# Altium footprint library MyPCBLib.PcbLib: 103 footprints (part 1 of 7)
Each footprint in its own frame and in the unit in brackets; x right, y up, seen from the top. Pads: shape width x height; smd on the part's side, far side on the other; paste and mask are expansions set on the pad; w line width, h text height; cw(c..) or ccw(c..) is an arc to the next point about the centre after c.
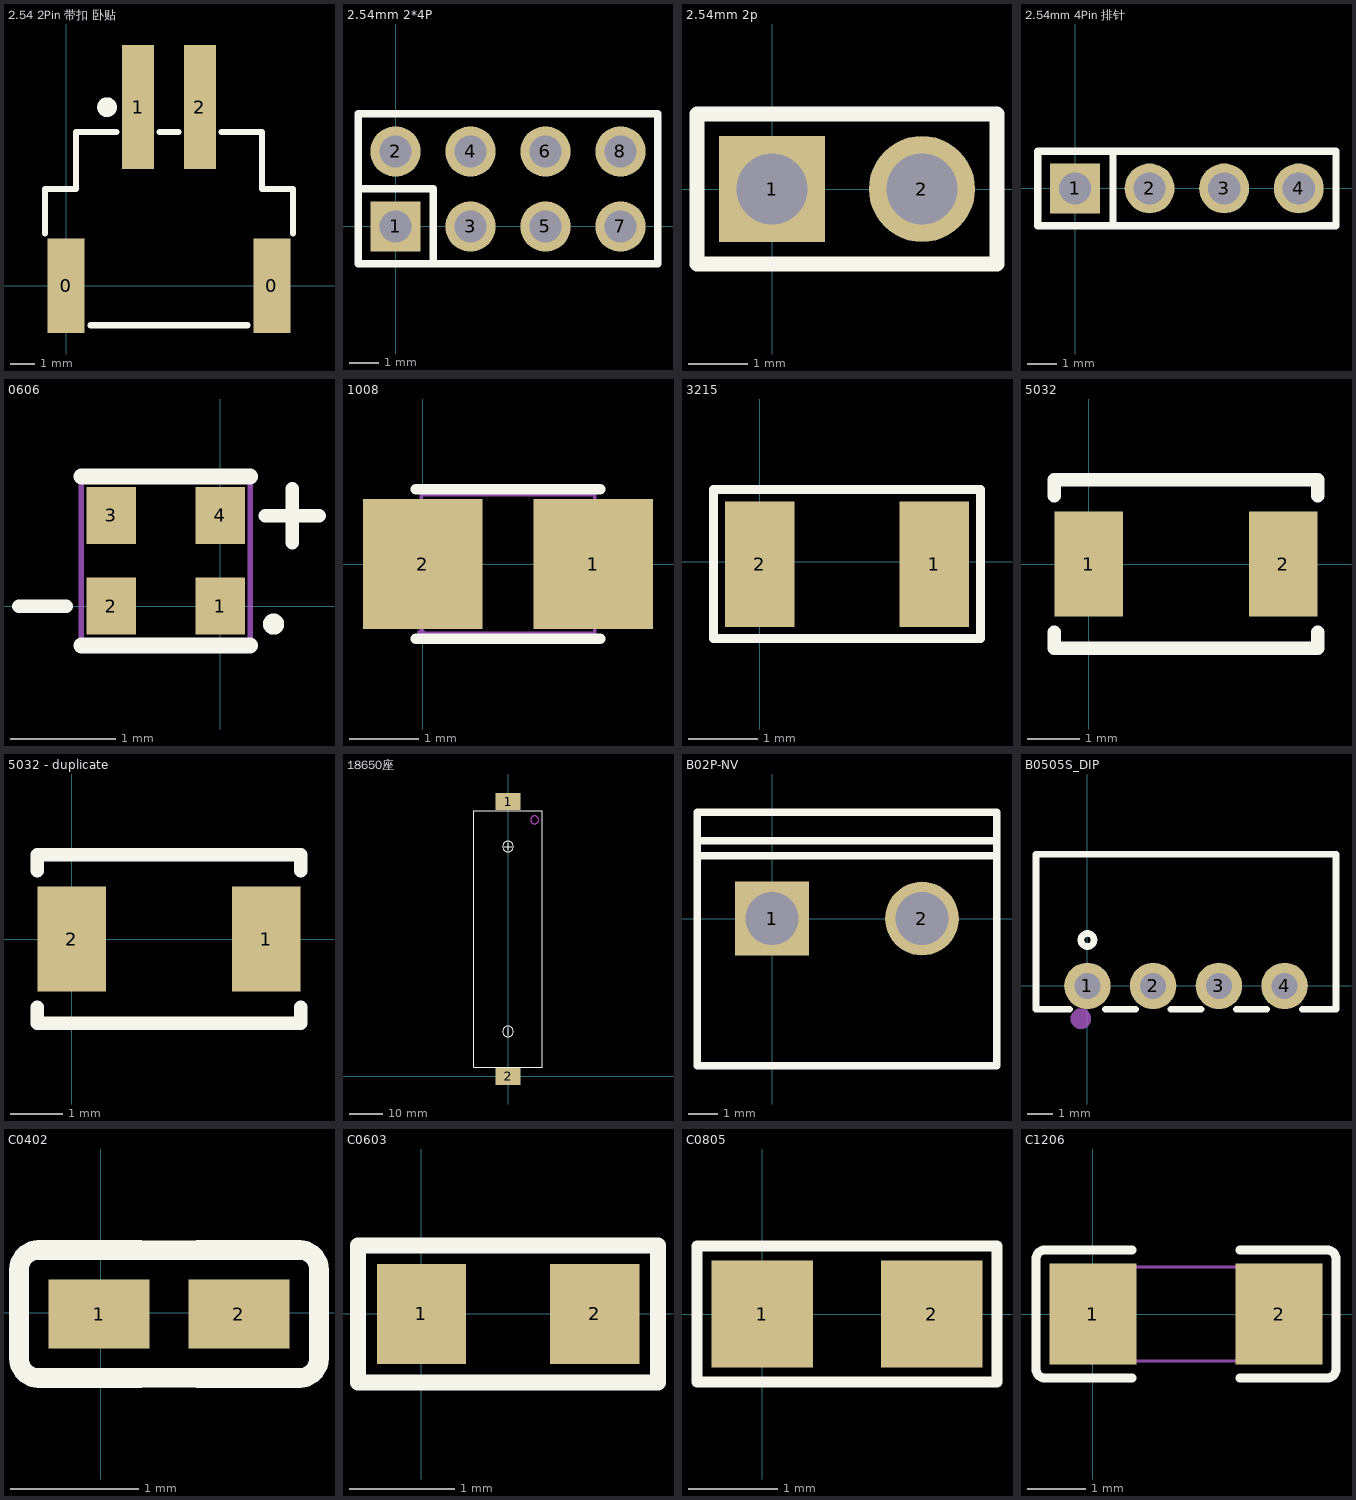
[diagram p0: the footprints below, top view; thin cyan lines are the x and y axes]

## 2.54 2Pin 带扣 卧贴 [mm]
pads (4):
  rect 1.5x3.8 smd paste+0 mask+0.05: 0(0,0) 0(8.3,0)
  rect 1.3x5 smd paste+0 mask+0.05: 1(2.9,7.2) 2(5.4,7.2)
Top Overlay:
  circle w0.4: c1.65,7.2 r0.2
  lines w0.254: -0.85,2.108 -0.85,3.9 0.4,3.9 0.4,6.2 2.019,6.2 ; 0.981,-1.6 7.319,-1.6 ; 3.781,6.2 4.519,6.2 ; 6.281,6.2 7.9,6.2 7.9,3.9 9.15,3.9 9.15,2.108

## 2.54mm 2*4P [mm]
pads (8):
  rect 1.7x1.7 hole 1.1: 1(0,0)
  round 1.7 hole 1.1: 2(0,2.54) 3(2.54,0) 4(2.54,2.54) 5(5.08,0) 6(5.08,2.54) 7(7.62,0) 8(7.62,2.54)
Top Overlay:
  lines w0.254: -1.27,1.27 1.27,1.27 1.27,-1.27 ; 8.88,3.81 -1.27,3.81 -1.27,-1.27 8.89,-1.27 8.89,3.81

## 2.54mm 2p [mm]
pads (2):
  rect 1.8x1.8 hole 1.2: 1(0,0)
  round 1.8 hole 1.2: 2(2.54,0)
Top Overlay:
  lines w0.254: -1.27,-1.27 -1.27,1.27 3.81,1.27 3.81,-1.27 -1.27,-1.27

## 2.54mm 4Pin 排针 [mm]
pads (4):
  rect 1.7x1.7 hole 1.1: 1(0,0)
  round 1.7 hole 1.1: 2(2.54,0) 3(5.08,0) 4(7.62,0)
Top Overlay:
  lines w0.254: 1.294,-1.27 1.294,1.27 ; 1.294,1.27 8.89,1.27 8.89,-1.27 -1.27,-1.27 -1.27,1.27 1.294,1.27
Mechanical 15:
  region: -1.21,-1.25 -1.21,-1.225 -1.245,-1.19 -1.295,-1.19 -1.33,-1.225 -1.33,-1.25 -1.33,-1.275 -1.295,-1.31 -1.245,-1.31 -1.21,-1.275
  region: -0.32,0.32 0.32,0.32 0.32,-0.32 -0.32,-0.32
  region: 2.22,0.32 2.86,0.32 2.86,-0.32 2.22,-0.32
  region: 4.76,0.32 5.4,0.32 5.4,-0.32 4.76,-0.32
  region: 7.3,0.32 7.94,0.32 7.94,-0.32 7.3,-0.32
  lines w0.051: -1.27,-1.25 -1.27,1.25 8.89,1.25 8.89,-1.25 -1.27,-1.25

## 0606 [mm] "华星光电 共阴RGB LED"
pads (4):
  rect 0.47x0.54 smd paste+0 mask+0.05: 1(0,0) 2(-1.03,0) 3(-1.03,0.86) 4(0,0.86)
Top Overlay:
  circle w0.1: c0.506,-0.17 r0.05
  lines w0.128: -1.905,0 -1.455,0 ; 0.429,0.857 0.937,0.857 ; 0.683,0.603 0.683,1.111
  lines w0.152: -1.315,-0.37 0.285,-0.37 ; -1.315,1.23 0.285,1.23
Mechanical 15:
  region: 0.345,-0.37 0.345,-0.345 0.31,-0.31 0.26,-0.31 0.225,-0.345 0.225,-0.37 0.225,-0.395 0.26,-0.43 0.31,-0.43 0.345,-0.395
  region: -1.24,1.115 -0.82,1.115 -0.82,0.605 -1.24,0.605
  region: -1.24,0.255 -0.82,0.255 -0.82,-0.255 -1.24,-0.255
  region: -0.21,0.255 0.21,0.255 0.21,-0.255 -0.21,-0.255
  region: -0.21,1.115 0.21,1.115 0.21,0.605 -0.21,0.605
  lines w0.051: -1.315,-0.37 -1.315,1.23 0.285,1.23 0.285,-0.37 -1.315,-0.37

## 1008 [mm] "电感"
pads (2):
  rect 1.724x1.87 smd: 1(2.456,0) 2(0,0)
Top Overlay:
  lines w0.152: -0.098,-1.076 2.554,-1.076 ; -0.098,1.076 2.554,1.076
Mechanical 15:
  region: 0.778,-0.825 -0.022,-0.825 -0.022,0.825 0.778,0.825
  region: 1.678,0.825 2.478,0.825 2.478,-0.825 1.678,-0.825
  region: 0.038,-1 0.038,-0.975 0.003,-0.94 -0.047,-0.94 -0.082,-0.975 -0.082,-1 -0.082,-1.025 -0.047,-1.06 0.003,-1.06 0.038,-1.025
  lines w0.051: -0.022,-1 2.478,-1 2.478,1 -0.022,1 -0.022,-1

## 3215 [mm]
pads (2):
  rect 1x1.8 smd: 1(2.5,-0.031) 2(0,-0.031)
Top Overlay:
  lines w0.128: -0.665,-1.097 3.164,-1.097 3.164,1.038 -0.597,1.038 -0.665,1.038 -0.665,-1.097

## 5032 [mm]
pads (2):
  rect 1.3x2 smd: 1(0,0) 2(3.7,0)
Top Overlay:
  lines w0.254: -0.65,-1.3 -0.65,-1.6 4.35,-1.6 4.35,-1.3 ; -0.65,1.3 -0.65,1.6 4.35,1.6 4.35,1.3
3D body "User Library-ABM3-1.STEP": height 1.3, standoff 0, extent -0.67,-1.61 4.33,1.59

## 5032 - duplicate [mm]
pads (2):
  rect 1.3x2 smd: 1(3.7,0) 2(0,0)
Top Overlay:
  lines w0.254: -0.65,-1.3 -0.65,-1.6 4.35,-1.6 4.35,-1.3 ; -0.65,1.3 -0.65,1.6 4.35,1.6 4.35,1.3
3D body "User Library-ABM3-1.STEP": height 1.3, standoff 0, extent -0.63,-1.59 4.37,1.61

## 18650座 [mil]
pads (2):
  rect 300x200 smd: 1(0,3253) 2(0,0)
Top Overlay:
  circle w10: c0,531.5 r63
  circle w10: c0,2721.5 r63
  lines w10: -45,2721.5 45,2721.5 ; 0,486.5 0,576.5 ; 0,2676.5 0,2766.5 ; -407.5,109 -407.5,3144 407.5,3144 407.5,109 -407.5,109
Keep-Out Layer:
  circle w0.2: c314.96,3037.52 r47.24
Mechanical 1:
  circle w0.2: c314.96,3037.52 r47.24

## B02P-NV [mm]
pads (2):
  rect 2.5x2.5 hole 1.8: 1(0,0)
  round 2.5 hole 1.8: 2(5.08,0)
Top Overlay:
  lines w0.254: -2.54,2.132 7.62,2.132 ; -2.54,2.64 7.62,2.64 ; -2.54,-4.98 -2.54,3.6 7.62,3.6 7.62,-4.98 -2.54,-4.98

## B0505S_DIP [mm]
pads (4):
  round 1.8 hole 1: 1(0,0) 2(2.54,0) 3(5.08,0) 4(7.62,0)
Top Overlay:
  circle w0.254: c0,1.778 r0.254
  lines w0.254: -0.684,-0.9 -1.99,-0.9 -1.99,5.1 9.61,5.1 9.61,-0.9 8.304,-0.9 ; 0.684,-0.9 1.856,-0.9 ; 3.224,-0.9 4.396,-0.9 ; 5.764,-0.9 6.936,-0.9
Mechanical 15:
  circle w0.4: c-0.254,-1.27 r0.2

## C0402 [mm]
pads (2):
  rect 0.79x0.54 smd paste-100 mask+0.051: 1(-0.011,-0.009) 2(1.079,-0.009)
Top Overlay:
  lines w0.152: -0.635,-0.356 ccw(c-0.483,-0.356) -0.483,-0.508 0.307,-0.508 0.76,-0.508 1.55,-0.508 ccw(c1.55,-0.356) 1.702,-0.356 1.702,0.337 ccw(c1.55,0.337) 1.55,0.489 0.76,0.489 0.307,0.489 -0.483,0.489 ccw(c-0.483,0.337) -0.635,0.337 -0.635,-0.356
Top Paste:
  region: 1.314,0.216 1.314,-0.234 1.264,-0.284 0.784,-0.284 0.714,-0.234 0.714,0.216 0.784,0.266 1.264,0.266
  region: 0.354,0.216 0.354,-0.234 0.284,-0.284 -0.196,-0.284 -0.246,-0.234 -0.246,0.216 -0.196,0.266 0.284,0.266

## C0603 [mm]
pads (2):
  rect 0.85x0.95 smd: 1(0,0) 2(1.65,0)
Top Overlay:
  lines w0.152: -0.604,-0.654 2.252,-0.654 2.252,-0.635 2.252,0.651 -0.604,0.651 -0.604,-0.654

## C0805 [mm]
pads (2):
  rect 1.14x1.2 smd: 1(0,0) 2(1.9,0)
Top Overlay:
  lines w0.127: -0.735,-0.762 -0.635,-0.762 2.635,-0.762 2.635,0.765 -0.735,0.765 -0.735,-0.762

## C1206 [mm]
pads (2):
  rect 1.485x1.728 smd mask+0.051: 1(0,0) 2(3.185,0)
Top Overlay:
  lines w0.152: 0.666,-1.093 -0.819,-1.093 cw(c-0.819,-0.94) -0.971,-0.94 -0.971,0.94 cw(c-0.819,0.94) -0.819,1.093 0.666,1.093 ; 2.519,-1.093 4.004,-1.093 ccw(c4.004,-0.94) 4.156,-0.94 4.156,0.94 ccw(c4.004,0.94) 4.004,1.093 2.519,1.093
Top Paste:
  region: 0.743,-0.764 0.743,-0.394 0.643,-0.294 0.338,-0.294 0.238,-0.194 0.238,0.194 0.338,0.294 0.643,0.294 0.743,0.394 0.743,0.764 0.643,0.864 -0.642,0.864 -0.742,0.764 -0.742,-0.764 -0.642,-0.864 0.643,-0.864
  region: 2.443,-0.764 2.443,-0.394 2.543,-0.294 2.847,-0.294 2.947,-0.194 2.947,0.194 2.847,0.294 2.543,0.294 2.443,0.394 2.443,0.764 2.543,0.864 3.828,0.864 3.928,0.764 3.928,-0.764 3.828,-0.864 2.543,-0.864
Mechanical 15:
  region: 3.193,-0.8 3.193,0.8 2.693,0.8 2.693,-0.8
  region: -0.007,-0.8 -0.007,0.8 0.493,0.8 0.493,-0.8
  region: 0.053,-0.8 0.053,-0.775 0.017,-0.74 -0.032,-0.74 -0.067,-0.775 -0.067,-0.8 -0.067,-0.825 -0.032,-0.86 0.017,-0.86 0.053,-0.825
  lines w0.051: -0.007,-0.8 3.193,-0.8 3.193,0.8 -0.007,0.8 -0.007,-0.8